# Altium footprint library fourholebutton.PcbLib: 1 footprints
Each footprint in its own frame and in the unit in brackets; x right, y up, seen from the top. Pads: shape width x height; smd on the part's side, far side on the other; paste and mask are expansions set on the pad; w line width, h text height; cw(c..) or ccw(c..) is an arc to the next point about the centre after c.
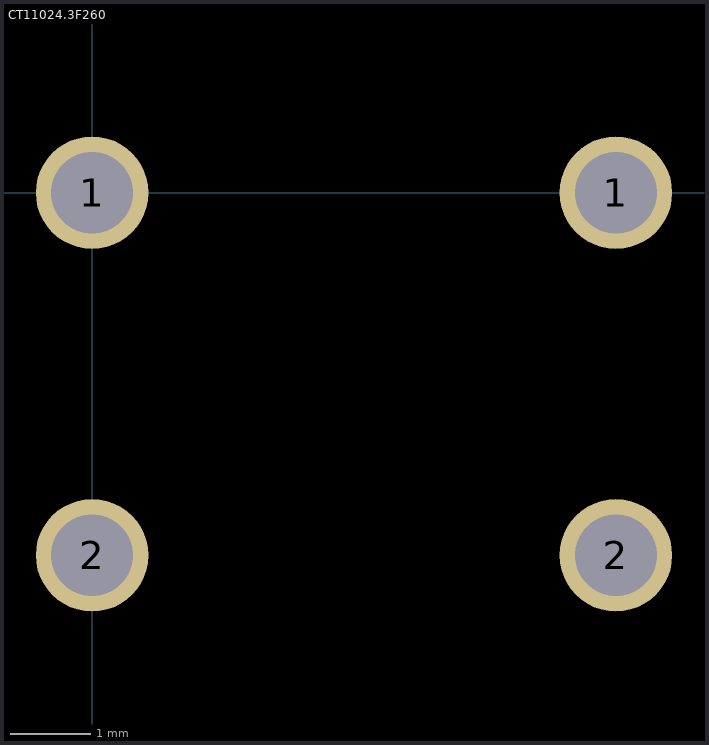
[diagram p0: the footprint, top view; thin cyan lines are the x and y axes]

## CT11024.3F260 [mil]
pads (4):
  round 55 hole 40: 1(0,0) 1(255.91,0) 2(0,-177.17) 2(255.91,-177.17)
3D body: height 169.29, standoff 137.79, extent 84.47,-115 165,-55
3D body: height 137.8, standoff 0, extent 0,-177.17 255.91,0